# Altium footprint library 2020-05-10_07-43-21.PcbLib: 1 footprints
Each footprint in its own frame and in the unit in brackets; x right, y up, seen from the top. Pads: shape width x height; smd on the part's side, far side on the other; paste and mask are expansions set on the pad; w line width, h text height; cw(c..) or ccw(c..) is an arc to the next point about the centre after c.
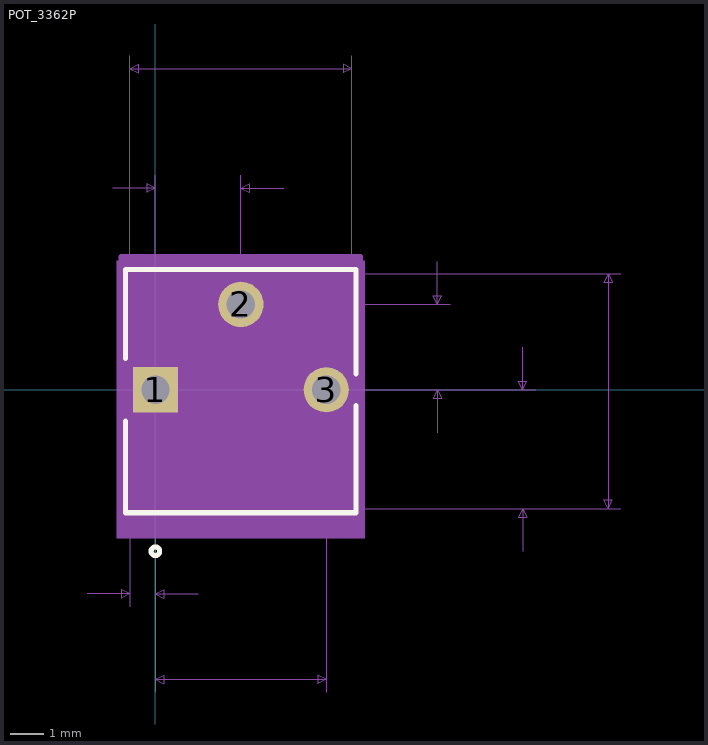
[diagram p0: the footprint, top view; thin cyan lines are the x and y axes]

## POT_3362P [mil]
pads (3):
  rect 53x53 hole 33 mask+0: 1(0,0)
  round 53 hole 33 mask+0: 2(100,100) 3(200,0)
Top Overlay:
  circle w6: c0,-189 r5
  lines w6: -35,-36.47 -35,-144 235,-144 235,-18.52 ; -35,36.47 -35,141 235,141 235,18.52
Mechanical 5:
  region: -45,151 245,151 245,-174 -45,-174
Mechanical 7:
  lines w1: -80,-239 -30,-239 ; -50,236 0,236 ; -30,-254 -30,-149 ; -30,136 -30,391 ; 0,-354 0,-36.5 ; 0,-254 0,-36.5 ; 0,251 0,-36.5 ; 50,-239 0,-239 ; 100,63.5 100,251 ; 136.5,100 345,100 ; 150,236 100,236 ; 200,-354 200,63.5 ; 230,391 230,136 545,136 ; 330,-50 330,0 ; 330,150 330,100 ; 345,0 236.5,0 445,0 ; 430,-189 430,-139 ; 430,50 430,0 ; 445,-139 230,-139 545,-139 ; -30,-239 -40,-234 -40,-244 -30,-239 ; -30,376 230,376 ; -30,376 -20,381 -20,371 -30,376 ; 0,-339 200,-339 ; 0,-339 10,-334 10,-344 0,-339 ; 0,-239 10,-234 10,-244 0,-239 ; 0,236 -10,241 -10,231 0,236 ; 100,236 110,241 110,231 100,236 ; 200,-339 190,-334 190,-344 200,-339 ; 230,376 220,381 220,371 230,376 ; 330,0 325,-10 335,-10 330,0 ; 330,100 325,110 335,110 330,100 ; 430,-139 425,-149 435,-149 430,-139 ; 430,0 425,10 435,10 430,0 ; 530,-139 530,136 ; 530,-139 525,-129 535,-129 530,-139 ; 530,136 525,126 535,126 530,136
  text "Pin 1 Padstyle: SX53Y53D33P" at -237.5,-489 h50
  text "Default Padstyle: EX53Y53D33P" at -262.5,-564 h50
  text "Alt 1 Padstyle: OX60Y90D30P" at -237.5,-639 h50
  text "Alt 2 Padstyle: OX90Y60D30P" at -237.5,-714 h50
  text "0.03in/0.762mm" at -102.5,-284 h25
  text "0.1in/2.54mm" at -25,256 h25
  text "0.2in/5.08mm" at 25,-384 h25
  text "0.26in/6.604mm" at 12.5,396 h25
  text "0.1in/2.54mm" at 350,36 h25
  text "0.139in/3.531mm" at 450,-81.25 h25
  text "0.275in/6.985mm" at 550,-14 h25
Mechanical 13:
  circle w0: c0,-129 r5
  lines w1: -30,-139 230,-139 230,136 -30,136 -30,-139
Mechanical 15:
  region: 240,-159 -40,-159 -40,156 240,156
  lines w6: -40,-159 -40,156 240,156 240,-159 -40,-159
3D body: height 10, standoff 0, extent 0,0 10,10